# Altium schematic symbol library IHLP2525CZER8R2M01.SchLib: 1 symbol
Pins are listed as number, name and electrical type; pins without a type are passive.

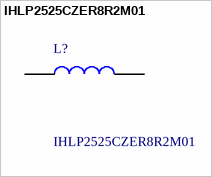
[diagram p0: symbol IHLP2525CZER8R2M01]

## IHLP2525CZER8R2M01
designator L?
Vishay IHLP Series Type 2525 Shielded Wire-wound SMD Inductor with a Metal Composite Core, 8.2 uH +/-20% Wire-Wound; Geometry.Height: 3mm; Mouser Part Number: 70-IHLP2525CZER8R2M1; Mouser Price/Stock: https://www.mouser.co.uk/ProductDetail/Vishay-Dale/IHLP2525CZER8R2M01?qs=uLRk3XvH1cLgjiQuM1Qn8A%3D%3D; Manufacturer_Name: Vishay; Manufacturer_Part_Number: IHLP2525CZER8R2M01; Datasheet Link: https://www.vishay.com/docs/34104/ihlp-2525cz-01.pdf
footprint INDPM6965X300N
pins: 1, 2